# Altium schematic symbol library Robert_.SchLib: 177 symbols (part 4 of 6)
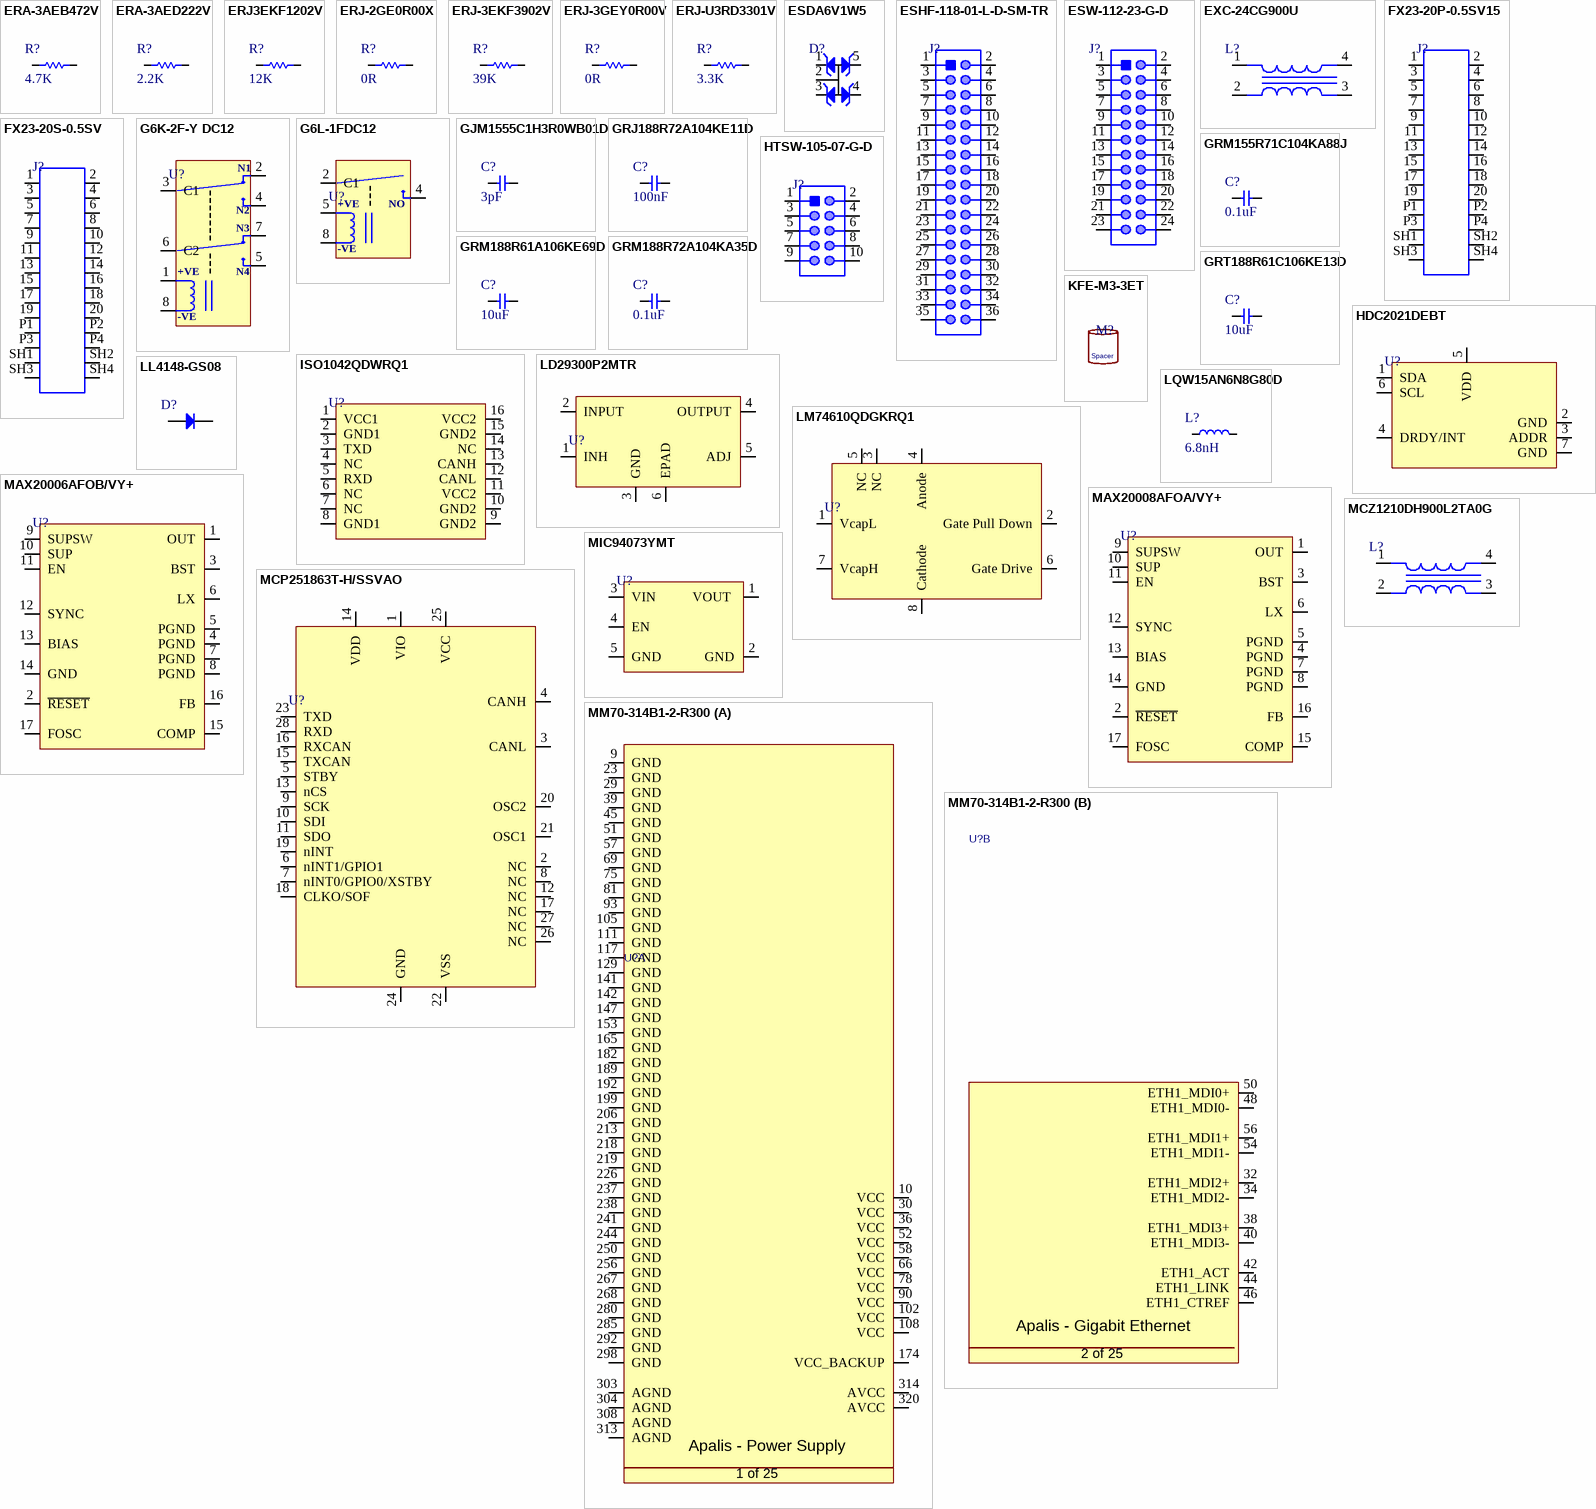
[diagram p9: symbols ERA-3AEB472V to MM70-314B1-2-R300]

## EXC-24CG900U
designator L?
CMC 100MA 2LN 90 OHM SMD; Manufacturer: Panasonic; Manufacturer Part Number: EXC-24CG900U; Supplier: Mouser; Supplier Part Number: 667-EXC-24CG900U; RoHS: Yes; Category: Common Mode Chokes; Stock: 7638; Pricing: 1=0.79, 10=0.547, 50=0.547, 100=0.468, 1000=0.319, 10000=0.293 (USD); ComponentLink1URL: https://datasheet.ciiva.com/11154/aeh0000ce16-11154827.pdf?src-supplier=Avnet; ComponentLink1Description: https://datasheet.ciiva.com/11154/aeh0000ce16-11154827.pdf?src-supplier=Avnet; ComponentLink2URL: https://datasheet.ciiva.com/6216/exc24cg20spec-6216648.pdf?src-supplier=Digi-Key; ComponentLink2Description: https://datasheet.ciiva.com/6216/exc24cg20spec-6216648.pdf?src-supplier=Digi-Key; ComponentLink3URL: https://datasheet.ciiva.com/30197/aeh0000ce16-30197409.pdf?src-supplier=Onlinecomponents.com; ComponentLink3Description: https://datasheet.ciiva.com/30197/aeh0000ce16-30197409.pdf?src-supplier=Onlinecomponents.com; ComponentLink4URL: https://datasheet.ciiva.com/7854/1322261-7854104.pdf?src-supplier=Element14; ComponentLink4Description: https://datasheet.ciiva.com/7854/1322261-7854104.pdf?src-supplier=Element14; ComponentLink5URL: https://datasheet.ciiva.com/22774/1322261-22774599.pdf?src-supplier=Farnell; ComponentLink5Description: https://datasheet.ciiva.com/22774/1322261-22774599.pdf?src-supplier=Farnell; ComponentLink6URL: https://datasheet.ciiva.com/6216/exc24cg-spec-6216651.pdf?src-supplier=Digi-Key; ComponentLink6Description: https://datasheet.ciiva.com/6216/exc24cg-spec-6216651.pdf?src-supplier=Digi-Key; ComponentLink7URL: https://datasheet.ciiva.com/6216/exc24cg-spec-6216654.pdf?src-supplier=Digi-Key; ComponentLink7Description: https://datasheet.ciiva.com/6216/exc24cg-spec-6216654.pdf?src-supplier=Digi-Key
footprint 0504 (1210 Metric), 4 Lead
pins: 1, 2, 3, 4

## FX23-20P-0.5SV15
designator J?
CONN HDR 20POS SMD GOLD; Manufacturer: Hirose; Manufacturer Part Number: FX23-20P-0.5SV15; Supplier: Future Electronics; Supplier Part Number: 4093766; RoHS: Yes; Category: Board to Board Connectors; Stock: 1092; Pricing: 84=2.41, 168=2.36, 252=2.34, 420=2.31, 840=2.25 (USD); ComponentLink1URL: https://www.hirose.com/product/en/download_file/key_name/FX23-20P-0.5SV15/category/Specification%20Sheet/doc_file_id/88145/?file_category_id=9&item_id=05733001000&is_series=&src-supplier=Digi-Key; ComponentLink1Description: https://www.hirose.com/product/en/download_file/key_name/FX23-20P-0.5SV15/category/Specification%20Sheet/doc_file_id/88145/?file_category_id=9&item_id=05733001000&is_series=&src-supplier=Digi-Key; ComponentLink2URL: https://datasheet.octopart.com/FX23-20P-0.5SV15-Hirose-datasheet-155938459.pdf?src-supplier=Sager+Electronics; ComponentLink2Description: https://datasheet.octopart.com/FX23-20P-0.5SV15-Hirose-datasheet-155938459.pdf?src-supplier=Sager+Electronics
footprint FX23-20P-0.5SV15
pins: 1, 2, 3, 4, 5, 6, 7, 8, 9, 10, 11, 12, 13, 14, 15, 16, 17, 18, 19, 20, P1, P2, P3, P4, SH1, SH2, SH3, SH4

## FX23-20S-0.5SV
designator J?
CONN RCPT 20POS SMD GOLD; Manufacturer: Hirose; Manufacturer Part Number: FX23-20S-0.5SV; Supplier: Future Electronics; Supplier Part Number: 9113545; RoHS: Yes; Category: Board to Board Connectors; Stock: 84; Pricing: 84=1.74, 252=1.69, 336=1.68, 840=1.65, 1260=1.61 (USD); ComponentLink1URL: https://datasheet.octopart.com/FX23-20S-0.5SV-Hirose-datasheet-147827136.pdf?src-supplier=Future+Electronics; ComponentLink1Description: https://datasheet.octopart.com/FX23-20S-0.5SV-Hirose-datasheet-147827136.pdf?src-supplier=Future+Electronics; ComponentLink2URL: https://www.hirose.com/product/en/download_file/key_name/FX23-20S-0.5SV/category/Specification%20Sheet/doc_file_id/88096/?file_category_id=9&item_id=05733201000&is_series=&src-supplier=Digi-Key; ComponentLink2Description: https://www.hirose.com/product/en/download_file/key_name/FX23-20S-0.5SV/category/Specification%20Sheet/doc_file_id/88096/?file_category_id=9&item_id=05733201000&is_series=&src-supplier=Digi-Key; ComponentLink3URL: https://datasheet.octopart.com/FX23-20S-0.5SV-Hirose-datasheet-155938459.pdf?src-supplier=Sager+Electronics; ComponentLink3Description: https://datasheet.octopart.com/FX23-20S-0.5SV-Hirose-datasheet-155938459.pdf?src-supplier=Sager+Electronics
footprint FX23-20S-0.5SV
pins: 1, 2, 3, 4, 5, 6, 7, 8, 9, 10, 11, 12, 13, 14, 15, 16, 17, 18, 19, 20, P1, P2, P3, P4, SH1, SH2, SH3, SH4

## G6K-2F-Y DC12
designator U?
RELAY TELECOM DPDT 1A 12VDC; Manufacturer: Omron; Manufacturer Part Number: G6K-2F-Y DC12; Supplier: Rs; Supplier Part Number: 2334168; RoHS: Yes; Category: Signal Relays; Stock: 2055; Pricing: 1=3.1, 10=2.99, 100=2.92, 250=2.78 (GBP)
footprint G6K-2F-Y DC12
pins: 1 +VE, 2 N1, 3 C1, 4 N2, 5 N4, 6 C2, 7 N3, 8 -VE

## G6L-1FDC12
designator U?
RELAY TELECOM SPST 1A 12VDC; Manufacturer: Omron; Manufacturer Part Number: G6L-1FDC12; Supplier: Arrow Electronics; Supplier Part Number: G6L-1F-DC12; RoHS: Yes; Category: Signal Relays; Stock: 764; Pricing: 1=3.229, 10=2.966, 25=2.652, 50=2.416, 100=2.239, 250=2.053, 500=1.91, 1000=1.756, 5000=1.705 (USD); ComponentLink1URL: https://datasheet.ciiva.com/2416/g6l-0614-2416511.pdf?src-supplier=Digi-Key; ComponentLink1Description: https://datasheet.ciiva.com/2416/g6l-0614-2416511.pdf?src-supplier=Digi-Key; ComponentLink2URL: https://datasheet.ciiva.com/15185/getdatasheetpartid-153492-15185645.pdf?src-supplier=Verical; ComponentLink2Description: https://datasheet.ciiva.com/15185/getdatasheetpartid-153492-15185645.pdf?src-supplier=Verical
footprint G6L-1FDC12
pins: 2 C1, 4 NO, 5 +VE, 8 -VE

## GJM1555C1H3R0WB01D
designator C?, comment 3pF
CAP CER 3PF 50V C0G/NP0 0402; Manufacturer: Murata; Manufacturer Part Number: GJM1555C1H3R0WB01D; Dielectric: C0G; Item Type: Capacitor; Supplier: Rs; Supplier Part Number: 1853357; RoHS: Yes; Category: Ceramic Capacitors; Stock: 2000; Pricing: 500=0.044, 2500=0.03, 5000=0.028 (GBP); Mounting Technology: Surface Mount; Case/Package: 0402; Case Code (Imperial): 0402; Case Code (Metric): 1005; Min Operating Temperature: -55°C; Max Operating Temperature: 125°C; Value: 3pF; Package Quantity: 10000; Packaging: Tape and Reel; Voltage Rating: 50V; Voltage Rating (DC): 50V; Termination: SMD/SMT; Series: GJM; Construction: Flat; Length: 1mm; Width: 0.02inch; Height: 0.5mm; Thickness: 0.022inch; Depth: 0.5mm; Radiation Hardening: No; RoHS Compliant: Yes; ComponentLink1URL: http://www.mouser.com/ds/2/281/c02e-2905.pdf?src-supplier=Mouser; ComponentLink1Description: http://www.mouser.com/ds/2/281/c02e-2905.pdf?src-supplier=Mouser; ComponentLink2URL: http://search.murata.co.jp/Ceramy/image/img/A01X/G101/ENG/GJM1555C1H3R0WB01-01.pdf?src-supplier=Digi-Key; ComponentLink2Description: http://search.murata.co.jp/Ceramy/image/img/A01X/G101/ENG/GJM1555C1H3R0WB01-01.pdf?src-supplier=Digi-Key; ComponentLink3URL: http://search.murata.co.jp/Ceramy/image/img/A01X/partnumbering_e_01.pdf?src-supplier=Digi-Key; ComponentLink3Description: http://search.murata.co.jp/Ceramy/image/img/A01X/partnumbering_e_01.pdf?src-supplier=Digi-Key; ComponentLink4URL: http://search.murata.co.jp/Ceramy/image/img/PDF/ENG/GJM1555C1H3R0WB01.pdf?src-supplier=Avnet; ComponentLink4Description: http://search.murata.co.jp/Ceramy/image/img/PDF/ENG/GJM1555C1H3R0WB01.pdf?src-supplier=Avnet; ComponentLink5URL: http://components.arrow.com/part/dataview/46522145S277297N2606?src-supplier=Arrow+Electronics; ComponentLink5Description: http://components.arrow.com/part/dataview/46522145S277297N2606?src-supplier=Arrow+Electronics; ComponentLink6URL: https://datasheet.octopart.com/GJM1555C1H3R0WB01D-Murata-datasheet-12511495.pdf?src-supplier=TME; ComponentLink6Description: https://datasheet.octopart.com/GJM1555C1H3R0WB01D-Murata-datasheet-12511495.pdf?src-supplier=TME
footprint Cap-0402
pins: 1, 2

## GRJ188R72A104KE11D
designator C?, comment 100nF
CAP CER 0.1UF 100V X7R 0603; Manufacturer: Murata; Manufacturer Part Number: GRJ188R72A104KE11D; Item Type: Capacitor; Supplier: Arrow Electronics; Supplier Part Number: GRJ188R72A104KE11D; RoHS: Yes; Category: Ceramic Capacitors; Stock: 1124; Pricing: 1=0.1544, 10=0.0939, 25=0.0801, 100=0.0545, 250=0.054, 500=0.0486, 1000=0.0431 (USD); ComponentLink1URL: https://www.murata.com/~/media/webrenewal/support/library/catalog/products/k70e.ashx?la=en-us&src-supplier=Digi-Key; ComponentLink1Description: https://www.murata.com/~/media/webrenewal/support/library/catalog/products/k70e.ashx?la=en-us&src-supplier=Digi-Key; ComponentLink2URL: https://datasheet.octopart.com/GRJ188R72A104KE11D-Murata-datasheet-32479577.pdf?src-supplier=Future+Electronics; ComponentLink2Description: https://datasheet.octopart.com/GRJ188R72A104KE11D-Murata-datasheet-32479577.pdf?src-supplier=Future+Electronics
footprint Cap-0603
pins: 1, 2

## GRM155R71C104KA88J
designator C?, comment 0.1uF
CAP CER 0.1UF 16V X7R 0402; Manufacturer: Murata; Manufacturer Part Number: GRM155R71C104KA88J; Material: 4241ConductorMaterial; Value: 100nF; Tolerance: 10%; Supplier: Arrow Electronics; Supplier Part Number: GRM155R71C104KA88J; RoHS: Yes; Category: Ceramic Capacitors; Stock: 300000; Pricing: 50000=0.004, 100000=0.0034, 150000=0.0033 (USD); Mounting Technology: Surface Mount; Case/Package: 0402; Pins: 2NUMBER; Case Code (Metric): 1005; Case Code (Imperial): 0402; Min Operating Temperature: -55°C; Max Operating Temperature: 125°C; Package Quantity: 1; Voltage Rating: 16V; Packaging: Tape and Reel; Dielectric: X7R; Voltage Rating (DC): 16V; Termination: SMD/SMT; Voltage: 16V; Series: GRM; Construction: Flat; Length: 1mm; Width: 0.02inch; Height: 0.5mm; Thickness: 0.022inch; Depth: 0.5mm; Radiation Hardening: No; Reach SVHC Compliant: No; Lead Free: Lead Free; RoHS Compliant: Yes; ComponentLink1URL: https://datasheet.ciiva.com/6271/product-6271168.pdf?src-supplier=Digi-Key; ComponentLink1Description: https://datasheet.ciiva.com/6271/product-6271168.pdf?src-supplier=Digi-Key; ComponentLink2URL: https://datasheet.ciiva.com/6271/grm155r71c104ka88-01-6271231.pdf?src-supplier=Digi-Key; ComponentLink2Description: https://datasheet.ciiva.com/6271/grm155r71c104ka88-01-6271231.pdf?src-supplier=Digi-Key
footprint Cap-0402
pins: 1, 2

## GRM188R61A106KE69D
designator C?, comment 10uF
CAP CER 10UF 10V X5R 0603; Manufacturer: Murata; Manufacturer Part Number: GRM188R61A106KE69D; Tolerance: 10%; Item Type: Capacitor; Supplier: Future Electronics; Supplier Part Number: 1008140; RoHS: Yes; Category: Ceramic Capacitors; Stock: 36000; Pricing: 4000=0.0237, 12000=0.0228, 20000=0.0224, 60000=0.0216, 100000=0.0209 (USD); Mounting Technology: Surface Mount; Case/Package: 0603; Case Code (Metric): 1608; Case Code (Imperial): 0603; Min Operating Temperature: -55°C; Max Operating Temperature: 85°C; Value: 10uF; Packaging: Cut Tape; Dielectric: X5R; Voltage Rating: 10V; Voltage: 10V; Voltage Rating (DC): 10V; Series: GRM; Length: 0.063inch; Width: 0.031inch; Height: 0.8mm; Thickness: 0.037inch; Depth: 0.8mm; Reach SVHC Compliant: No; Lead Free: Lead Free; RoHS Compliant: Yes; ComponentLink1URL: http://www.farnell.com/datasheets/1955682.pdf?src-supplier=Farnell; ComponentLink1Description: http://www.farnell.com/datasheets/1955682.pdf?src-supplier=Farnell; ComponentLink2URL: http://www.mouser.com/ds/2/281/c02e-2905.pdf?src-supplier=Mouser; ComponentLink2Description: http://www.mouser.com/ds/2/281/c02e-2905.pdf?src-supplier=Mouser; ComponentLink3URL: http://www.farnell.com/datasheets/1955682.pdf?src-supplier=Newark; ComponentLink3Description: http://www.farnell.com/datasheets/1955682.pdf?src-supplier=Newark; ComponentLink4URL: http://www.farnell.com/datasheets/1955682.pdf?src-supplier=Element14; ComponentLink4Description: http://www.farnell.com/datasheets/1955682.pdf?src-supplier=Element14; ComponentLink5URL: https://datasheet.octopart.com/GRM188R61A106KE69D-Murata-datasheet-46741888.pdf?src-supplier=Element14; ComponentLink5Description: https://datasheet.octopart.com/GRM188R61A106KE69D-Murata-datasheet-46741888.pdf?src-supplier=Element14; ComponentLink6URL: http://search.murata.co.jp/Ceramy/image/img/A01X/G101/ENG/GRM188R61A106KE69-01.pdf?src-supplier=Digi-Key; ComponentLink6Description: http://search.murata.co.jp/Ceramy/image/img/A01X/G101/ENG/GRM188R61A106KE69-01.pdf?src-supplier=Digi-Key; ComponentLink7URL: http://psearch.en.murata.com/capacitor/product/GRM188R61A106KE69%23.pdf?src-supplier=Avnet; ComponentLink7Description: http://psearch.en.murata.com/capacitor/product/GRM188R61A106KE69%23.pdf?src-supplier=Avnet
footprint Cap-0603
pins: 1, 2

## GRM188R72A104KA35D
designator C?, comment 0.1uF
CAP CER 0.1UF 100V X7R 0603; Manufacturer: Murata; Manufacturer Part Number: GRM188R72A104KA35D; Material: Ceramic; Value: 100nF; Tolerance: 10%; Supplier: Arrow Electronics; Supplier Part Number: GRM188R72A104KA35D; RoHS: Yes; Category: Ceramic Capacitors; Stock: 28393; Pricing: 1=0.1781, 10=0.0788, 25=0.078, 100=0.0455, 250=0.045, 500=0.0427, 1000=0.0376, 3000=0.0371, 6000=0.0368, 15000=0.0319 (USD); Mounting Technology: Surface Mount; Case/Package: 0603; Weight: 0.000222oz; Case Code (Imperial): 0603; Case Code (Metric): 1608; Min Operating Temperature: -55°C; Max Operating Temperature: 125°C; Dielectric: X7R; Voltage Rating: 100V; Voltage Rating (DC): 100V; Packaging: Tape and Reel; Package Quantity: 1; Termination: SMD/SMT; Voltage: 100V; Series: GRM; Construction: Flat; Length: 1.6mm; Width: 0.031inch; Height: 0.8mm; Thickness: 0.035inch; Depth: 0.8mm; Size: 0.8mm; Radiation Hardening: No; Reach SVHC Compliant: No; Lead Free: Lead Free; RoHS Compliant: Yes; ComponentLink1URL: https://datasheet.ciiva.com/18100/getdatasheetpartid-27818-18100710.pdf?src-supplier=Verical; ComponentLink1Description: https://datasheet.ciiva.com/18100/getdatasheetpartid-27818-18100710.pdf?src-supplier=Verical; ComponentLink2URL: https://datasheet.ciiva.com/22703/1747473-22703345.pdf?src-supplier=Element14; ComponentLink2Description: https://datasheet.ciiva.com/22703/1747473-22703345.pdf?src-supplier=Element14; ComponentLink3URL: https://datasheet.ciiva.com/34302/1857815-34302863.pdf?src-supplier=Jameco; ComponentLink3Description: https://datasheet.ciiva.com/34302/1857815-34302863.pdf?src-supplier=Jameco; ComponentLink4URL: https://datasheet.ciiva.com/11787/0900766b80ef921d-11787064.pdf?src-supplier=Rs; ComponentLink4Description: https://datasheet.ciiva.com/11787/0900766b80ef921d-11787064.pdf?src-supplier=Rs; ComponentLink5URL: https://datasheet.ciiva.com/29201/451984-da-01-en-vs-kondensator-0603-29201725.pdf?src-supplier=Conrad; ComponentLink5Description: https://datasheet.ciiva.com/29201/451984-da-01-en-vs-kondensator-0603-29201725.pdf?src-supplier=Conrad; ComponentLink6URL: https://datasheet.ciiva.com/7937/1747473-7937676.pdf?src-supplier=Element14; ComponentLink6Description: https://datasheet.ciiva.com/7937/1747473-7937676.pdf?src-supplier=Element14; ComponentLink7URL: https://datasheet.ciiva.com/135/partnumbering-e-01-135140.pdf?src-supplier=Digi-Key; ComponentLink7Description: https://datasheet.ciiva.com/135/partnumbering-e-01-135140.pdf?src-supplier=Digi-Key; ComponentLink8URL: https://datasheet.ciiva.com/135/partnumbering-e-01-135139.pdf?src-supplier=Digi-Key; ComponentLink8Description: https://datasheet.ciiva.com/135/partnumbering-e-01-135139.pdf?src-supplier=Digi-Key; ComponentLink9URL: https://datasheet.ciiva.com/135/partnumbering-e-01-135141.pdf?src-supplier=Digi-Key; ComponentLink9Description: https://datasheet.ciiva.com/135/partnumbering-e-01-135141.pdf?src-supplier=Digi-Key; ComponentLink10URL: https://datasheet.ciiva.com/16382/product-16382965.pdf?src-supplier=Future+Electronics; ComponentLink10Description: https://datasheet.ciiva.com/16382/product-16382965.pdf?src-supplier=Future+Electronics
footprint Cap-0603
pins: 1, 2

## GRT188R61C106KE13D
designator C?, comment 10uF
CAP CER 10UF 16V X5R 0603; Manufacturer: Murata; Manufacturer Part Number: GRT188R61C106KE13D; Supplier: Arrow Electronics; Supplier Part Number: GRT188R61C106KE13D; RoHS: Yes; Category: Ceramic Capacitors; Stock: 26129; Pricing: 1=0.3636, 10=0.1969, 25=0.195, 100=0.1263, 250=0.125, 500=0.113, 1000=0.0949, 3000=0.0939, 6000=0.093, 15000=0.0784 (USD); ComponentLink1URL: http://search.murata.co.jp/Ceramy/image/img/A01X/G101/ENG/GRT188R61C106KE13-01.pdf?src-supplier=Digi-Key; ComponentLink1Description: http://search.murata.co.jp/Ceramy/image/img/A01X/G101/ENG/GRT188R61C106KE13-01.pdf?src-supplier=Digi-Key
footprint Cap-0603
pins: 1, 2

## HDC2021DEBT
designator U?
SENSOR MULT HUMIDITY/TEMP; Manufacturer: Texas Instruments; Manufacturer Part Number: HDC2021DEBT; Supplier: Mouser; Supplier Part Number: 595-HDC2021DEBT; RoHS: No; Category: Integrated Circuits (ICs); Stock: 4417; Pricing: 1=5.04, 10=3.2, 50=3.2, 100=3.1, 1000=2.42, 10000=2.33 (USD)
footprint HDC2021DEBT
pins: 1 SDA, 2 GND, 3 ADDR, 4 DRDY/INT, 5 VDD, 6 SCL, 7 GND

## HTSW-105-07-G-D
designator J?
CONN HEADER VERT 10POS 2.54MM; Manufacturer: Samtec; Manufacturer Part Number: HTSW-105-07-G-D; Supplier: Rs; Supplier Part Number: 1592350; RoHS: Yes; Category: Connectors; Stock: 16; Pricing: 1=1.3, 25=1.16, 50=1.09, 100=1, 500=0.81 (GBP); ComponentLink1URL: https://datasheet.ciiva.com/737/htsw-xxx-xx-xxx-x-xx-xx-xx-mkt-737898.pdf?src-supplier=Digi-Key; ComponentLink1Description: https://datasheet.ciiva.com/737/htsw-xxx-xx-xxx-x-xx-xx-xx-mkt-737898.pdf?src-supplier=Digi-Key; ComponentLink2URL: https://datasheet.ciiva.com/15195/getdatasheetpartid-252145-15195445.pdf?src-supplier=Verical; ComponentLink2Description: https://datasheet.ciiva.com/15195/getdatasheetpartid-252145-15195445.pdf?src-supplier=Verical
footprint HTSW-105-07-G-D
pins: 1, 2, 3, 4, 5, 6, 7, 8, 9, 10

## ISO1042QDWRQ1
designator U?
IC TRANSCEIVER FULL 1/1 16SOIC; Manufacturer: Texas Instruments; Manufacturer Part Number: ISO1042QDWRQ1; Supplier: Mouser; Supplier Part Number: 595-ISO1042QDWRQ1; RoHS: Yes; Category: Interface ICs; Stock: 7185; Pricing: 1=4.22, 10=3.8, 50=3.8, 100=3.11, 1000=2.24, 10000=2.04 (USD); ComponentLink1URL: http://www.ti.com/general/docs/suppproductinfo.tsp?distId=10&amp;gotoUrl=http%3A%2F%2Fwww.ti.com%2Flit%2Fgpn%2Fiso1042-q1&src-supplier=Digi-Key; ComponentLink1Description: http://www.ti.com/general/docs/suppproductinfo.tsp?distId=10&amp;gotoUrl=http%3A%2F%2Fwww.ti.com%2Flit%2Fgpn%2Fiso1042-q1&src-supplier=Digi-Key; ComponentLink2URL: http://www.ti.com/lit/ds/symlink/iso1042-q1.pdf?src-supplier=Digi-Key; ComponentLink2Description: http://www.ti.com/lit/ds/symlink/iso1042-q1.pdf?src-supplier=Digi-Key; LCSC Part Number: C2671569; Item Type: IC
footprint SOP-16-300mil
pins: 1 VCC1, 2 GND1, 3 TXD, 4 NC, 5 RXD, 6 NC, 7 NC, 8 GND1, 9 GND2, 10 GND2, 11 VCC2, 12 CANL, 13 CANH, 14 NC, 15 GND2, 16 VCC2

## KFE-M3-3ET
designator M?
Standoffs & Spacers Broaching Standoff M3 3mm Carbon Steel; Manufacturer: PennEngineering; Manufacturer Part Number: KFE-M3-3ET; Supplier: Mouser; Supplier Part Number: 153-KFE-M3-3ET; RoHS: No; Stock: 27757; Pricing: 1=0.47, 10=0.445, 50=0.324, 100=0.3, 1000=0.229, 10000=0.19 (USD)
text: Spacer

## LD29300P2MTR
designator U?
IC REG LINEAR POS ADJ 3A P2PAK-4; Manufacturer: STMicroelectronics; Manufacturer Part Number: LD29300P2MTR; Supplier: Mouser; Supplier Part Number: 511-LD29300P2MTR; RoHS: Yes; Category: Voltage Regulators - Linear; Stock: 29557; Pricing: 1=1.81, 10=1.63, 50=1.54, 100=1.31, 1000=0.908, 10000=0.886 (USD); ComponentLink1URL: https://datasheet.ciiva.com/17077/ld29300p2mtr-17077916.pdf?src-supplier=Allied+Electronics; ComponentLink1Description: https://datasheet.ciiva.com/17077/ld29300p2mtr-17077916.pdf?src-supplier=Allied+Electronics; ComponentLink2URL: https://datasheet.ciiva.com/41440/001185831-da-01-en-ic-reg-ldo-adj-ld29300p2mtr-to-263-6-stm-41440915.pdf?src-supplier=Conrad; ComponentLink2Description: https://datasheet.ciiva.com/41440/001185831-da-01-en-ic-reg-ldo-adj-ld29300p2mtr-to-263-6-stm-41440915.pdf?src-supplier=Conrad; ComponentLink3URL: https://datasheet.ciiva.com/2044/cd00003208-2044196.pdf?src-supplier=Digi-Key; ComponentLink3Description: https://datasheet.ciiva.com/2044/cd00003208-2044196.pdf?src-supplier=Digi-Key; ComponentLink4URL: https://datasheet.ciiva.com/2044/cd00003208-2044197.pdf?src-supplier=Digi-Key; ComponentLink4Description: https://datasheet.ciiva.com/2044/cd00003208-2044197.pdf?src-supplier=Digi-Key; ComponentLink5URL: https://datasheet.ciiva.com/2044/cd00003208-2044198.pdf?src-supplier=Digi-Key; ComponentLink5Description: https://datasheet.ciiva.com/2044/cd00003208-2044198.pdf?src-supplier=Digi-Key
footprint P2PAK-4
pins: 1 INH, 2 INPUT, 3 GND, 4 OUTPUT, 5 ADJ, 6 EPAD

## LL4148-GS08
designator D?
DIODE GEN PURP 75V 300MA SOD80; Manufacturer: Vishay; Manufacturer Part Number: LL4148-GS08; Max Power Dissipation: 500mW; Forward Current: 150mA; Reverse Recovery Time: 8ns; Peak Non-Repetitive Surge Current: 2A; Max Repetitive Reverse Voltage (Vrrm): 100V; Primary Type: SWITCHING; Outside Diameter: 1.5mm; Supplier: Mouser; Supplier Part Number: 78-LL4148; RoHS: Yes; Category: Rectifier Diodes; Stock: 423192; Pricing: 1=0.14, 10=0.126, 50=0.126, 100=0.06, 500=0.037, 1000=0.028, 2500=0.022, 10000=0.019, 25000=0.017, 50000=0.015 (USD); Mounting Technology: Surface Mount; Pins: 2; Min Operating Temperature: -65°C; Max Operating Temperature: 175°C; Packaging: Cut Tape; Package Quantity: 1; Average Rectified Current: 300mA; Power Dissipation: 500mW; Max Forward Surge Current (Ifsm): 2A; Termination: SMD/SMT; Current Rating: 150mA; Voltage: 100V; Max Reverse Voltage (DC): 75V; Series: -; Reverse Recovery Time-Max: 8ns; Diameter: 1.6mm; Length: 3.7mm; Radiation Hardening: No; Lead Free: Lead Free; RoHS Compliant: Yes; Reach SVHC Compliant: Unknown; ComponentLink1URL: https://datasheet.ciiva.com/4246/ll4148-4246131.pdf?src-supplier=Arrow+Electronics; ComponentLink1Description: https://datasheet.ciiva.com/4246/ll4148-4246131.pdf?src-supplier=Arrow+Electronics; ComponentLink2URL: https://datasheet.ciiva.com/1243/1353494-1243008.pdf?src-supplier=Newark; ComponentLink2Description: https://datasheet.ciiva.com/1243/1353494-1243008.pdf?src-supplier=Newark; ComponentLink3URL: https://datasheet.ciiva.com/34301/891018-34301682.pdf?src-supplier=Jameco; ComponentLink3Description: https://datasheet.ciiva.com/34301/891018-34301682.pdf?src-supplier=Jameco; ComponentLink4URL: https://datasheet.ciiva.com/1181/1513919-1181029.pdf?src-supplier=Element14; ComponentLink4Description: https://datasheet.ciiva.com/1181/1513919-1181029.pdf?src-supplier=Element14; ComponentLink5URL: https://datasheet.ciiva.com/1243/1699941-1243749.pdf?src-supplier=Newark; ComponentLink5Description: https://datasheet.ciiva.com/1243/1699941-1243749.pdf?src-supplier=Newark; ComponentLink6URL: https://datasheet.ciiva.com/26311/1722544-26311744.pdf?src-supplier=Element14; ComponentLink6Description: https://datasheet.ciiva.com/26311/1722544-26311744.pdf?src-supplier=Element14; ComponentLink7URL: https://datasheet.ciiva.com/1181/1353494-1181031.pdf?src-supplier=Element14; ComponentLink7Description: https://datasheet.ciiva.com/1181/1353494-1181031.pdf?src-supplier=Element14; ComponentLink8URL: https://datasheet.ciiva.com/5829/1513919-5829997.pdf?src-supplier=Farnell; ComponentLink8Description: https://datasheet.ciiva.com/5829/1513919-5829997.pdf?src-supplier=Farnell; ComponentLink9URL: https://datasheet.ciiva.com/13946/ll4148-13946731.pdf?src-supplier=Digi-Key; ComponentLink9Description: https://datasheet.ciiva.com/13946/ll4148-13946731.pdf?src-supplier=Digi-Key; ComponentLink10URL: https://datasheet.ciiva.com/13946/ll4148-13946732.pdf?src-supplier=Digi-Key; ComponentLink10Description: https://datasheet.ciiva.com/13946/ll4148-13946732.pdf?src-supplier=Digi-Key; ComponentLink11URL: https://datasheet.ciiva.com/16298/ll4148-16298094.pdf?src-supplier=Future+Electronics; ComponentLink11Description: https://datasheet.ciiva.com/16298/ll4148-16298094.pdf?src-supplier=Future+Electronics; ComponentLink12URL: https://datasheet.ciiva.com/1181/1353494-1181030.pdf?src-supplier=Element14; ComponentLink12Description: https://datasheet.ciiva.com/1181/1353494-1181030.pdf?src-supplier=Element14; ComponentLink13URL: https://datasheet.ciiva.com/4434/ll4148-105055-4434938.pdf?src-supplier=Mouser; ComponentLink13Description: https://datasheet.ciiva.com/4434/ll4148-105055-4434938.pdf?src-supplier=Mouser; ComponentLink14URL: https://datasheet.ciiva.com/8287/ll4148-8287871.pdf?src-supplier=Avnet; ComponentLink14Description: https://datasheet.ciiva.com/8287/ll4148-8287871.pdf?src-supplier=Avnet; ComponentLink15URL: https://datasheet.ciiva.com/8287/ll4148-8287869.pdf?src-supplier=Avnet; ComponentLink15Description: https://datasheet.ciiva.com/8287/ll4148-8287869.pdf?src-supplier=Avnet; ComponentLink16URL: https://datasheet.ciiva.com/13946/ll4148-13946733.pdf?src-supplier=Digi-Key; ComponentLink16Description: https://datasheet.ciiva.com/13946/ll4148-13946733.pdf?src-supplier=Digi-Key; ComponentLink17URL: https://datasheet.ciiva.com/25936/ll4148-25936391.pdf?; ComponentLink17Description: https://datasheet.ciiva.com/25936/ll4148-25936391.pdf?
footprint SOD-80 MiniMELF
pins: 1 K, 2 A

## LM74610QDGKRQ1
designator U?
IC SMART DIODE CTLR 8VSSOP; Manufacturer: Texas Instruments; Manufacturer Part Number: LM74610QDGKRQ1; Supplier: Mouser; Supplier Part Number: 595-LM74610QDGKRQ1; RoHS: Yes; Category: Power Management ICs; Stock: 5066; Pricing: 1=2.47, 10=2.1, 50=2.1, 100=1.83, 1000=1.31, 10000=1.14 (USD); ComponentLink1URL: http://www.ti.com/lit/ds/symlink/lm74610-q1.pdf?src-supplier=Digi-Key; ComponentLink1Description: http://www.ti.com/lit/ds/symlink/lm74610-q1.pdf?src-supplier=Digi-Key
footprint VSSOP-8 (3x3)
pins: 1 VcapL, 2 Gate Pull Down, 3 NC, 4 Anode, 5 NC, 6 Gate Drive, 7 VcapH, 8 Cathode

## LQW15AN6N8G80D
designator L?, comment 6.8nH
FIXED IND 6.8NH 1.45A 0.068OHM; Manufacturer: Murata Electronics; Manufacturer Part Number: LQW15AN6N8G80D; Item Type: Inductor; Package: 0402; Value: 6.8NH; ComponentLink1Description: Digikey; ComponentLink1URL: https://www.digikey.com/en/products/detail/murata-electronics/LQW15AN6N8G80D/4905972?s=N4IgTCBcDaIDIEUDqBGArAQQHIDYsA4BxfABgBEQBdAXyA
footprint IND-0402
pins: 1, 2

## MAX20006AFOB/VY+
designator U?
36V, 220KHZ TO 2.2MHZ, 4A/6A/8A; Manufacturer: Maxim; Manufacturer Part Number: MAX20006AFOB/VY+; Supplier: Mouser; Supplier Part Number: 700-MAX20006AFOB/VY+; RoHS: Yes; Category: Voltage Regulators - Switching; Stock: 619; Pricing: 1=5.03, 10=4.28, 50=4.28, 100=3.71, 1000=2.73, 10000=2.6 (USD)
footprint 17-FC2QFN (3.5x3.75)
pins: 1 OUT, 2 ~{RESET}, 3 BST, 4 PGND, 5 PGND, 6 LX, 7 PGND, 8 PGND, 9 SUPSW, 10 SUP, 11 EN, 12 SYNC, 13 BIAS, 14 GND, 15 COMP, 16 FB, 17 FOSC

## MAX20008AFOA/VY+
designator U?
36V, 220KHZ TO 2.2MHZ, 4A/6A/8A; Manufacturer: Analog Devices; Manufacturer Part Number: MAX20008AFOA/VY+; Supplier: Mouser; Supplier Part Number: 700-MAX20008AFOA/VY+; RoHS: No; Stock: 429; Pricing: 1=5.55, 10=4.86, 50=4.86, 100=4.08, 1000=3.46, 10000=3.46 (USD)
footprint 17-FC2QFN (3.5x3.75)
pins: 1 OUT, 2 ~{RESET}, 3 BST, 4 PGND, 5 PGND, 6 LX, 7 PGND, 8 PGND, 9 SUPSW, 10 SUP, 11 EN, 12 SYNC, 13 BIAS, 14 GND, 15 COMP, 16 FB, 17 FOSC

## MCP251863T-H/SSVAO
designator U?
STAND-ALONE LOW POWER CAN FD CON; Manufacturer: Microchip; Manufacturer Part Number: MCP251863T-H/SSVAO; Item Type: IC; Supplier: Digi-Key; Supplier Part Number: 150-MCP251863T-H/SSVAOTR-ND; RoHS: No; Category: Uncategorized
footprint SSOP-28-208mil
pins: 1 VIO, 2 NC, 3 CANL, 4 CANH, 5 STBY, 6 nINT1/GPIO1, 7 nINT0/GPIO0/XSTBY, 8 NC, 9 SCK, 10 SDI, 11 SDO, 12 NC, 13 nCS, 14 VDD, 15 TXCAN, 16 RXCAN, 17 NC, 18 CLKO/SOF, 19 nINT, 20 OSC2, 21 OSC1, 22 VSS, 23 TXD, 24 GND, 25 VCC, 26 NC, 27 NC, 28 RXD

## MCZ1210DH900L2TA0G
designator L?
CMC 100MA 2LN 90 OHM SMD; Manufacturer: TDK; Manufacturer Part Number: MCZ1210DH900L2TA0G; Supplier: Mouser; Supplier Part Number: 810-MCZ1210DH900L2TG; RoHS: Yes; Category: Common Mode Chokes; Stock: 11260; Pricing: 1=0.58, 10=0.372, 50=0.372, 100=0.297, 1000=0.231, 10000=0.231 (USD); ComponentLink1URL: https://media.digikey.com/pdf/Data%20Sheets/TDK%20PDFs/MCZ_Series_Br.pdf?src-supplier=Digi-Key; ComponentLink1Description: https://media.digikey.com/pdf/Data%20Sheets/TDK%20PDFs/MCZ_Series_Br.pdf?src-supplier=Digi-Key; ComponentLink2URL: https://product.tdk.com/info/en/catalog/datasheets/cmf_commercial_signal_mcz1210dh_en.pdf?src-supplier=Digi-Key; ComponentLink2Description: https://product.tdk.com/info/en/catalog/datasheets/cmf_commercial_signal_mcz1210dh_en.pdf?src-supplier=Digi-Key
footprint MCZ1210DH900L2TA0G
pins: 1, 2, 3, 4

## MIC94073YMT
designator U?
HIGH SIDE POWER SWITCHES; Manufacturer: Mirel Inc.; Manufacturer Part Number: MIC94073YMT; Package: 4-UFDFN Exposed Pad, 4-TMLF®; Item Type: Power Switch
footprint 4-TMLF® (1.2x1.6)
pins: 1 VOUT , 2 GND, 3 VIN, 4 EN, 5 GND

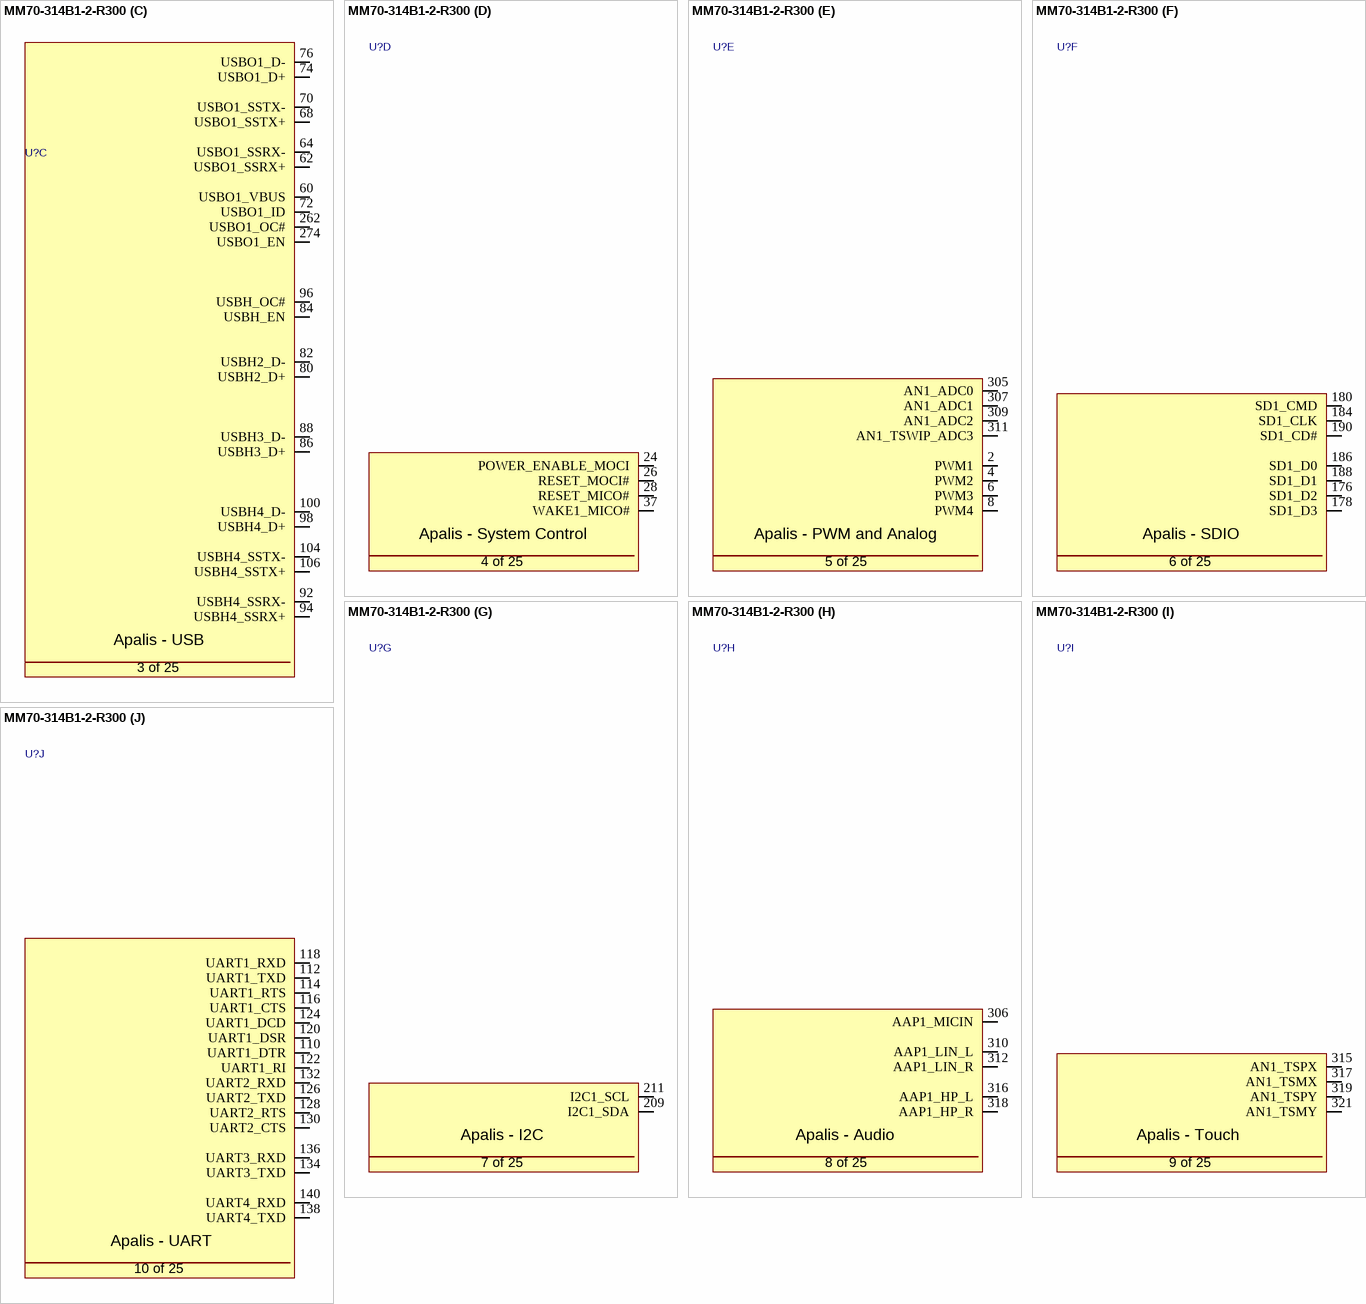
[diagram p3: symbol MM70-314B1-2-R300]

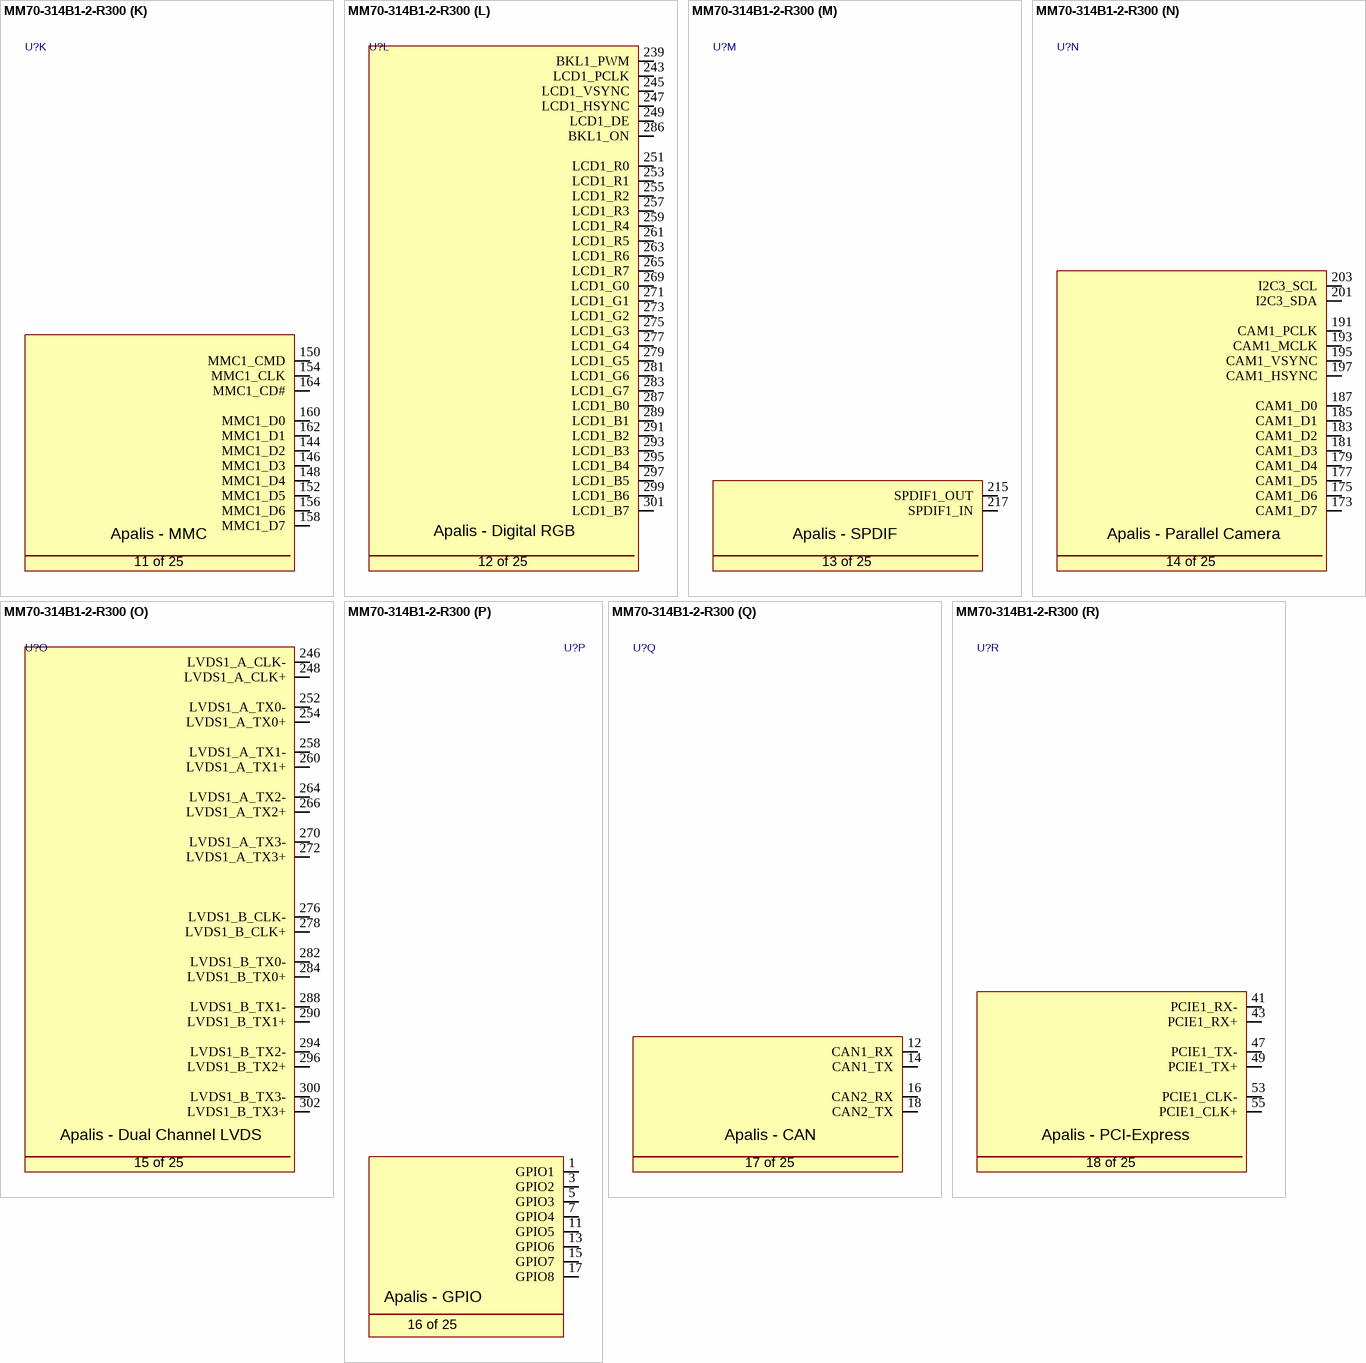
[diagram p4: symbol MM70-314B1-2-R300]

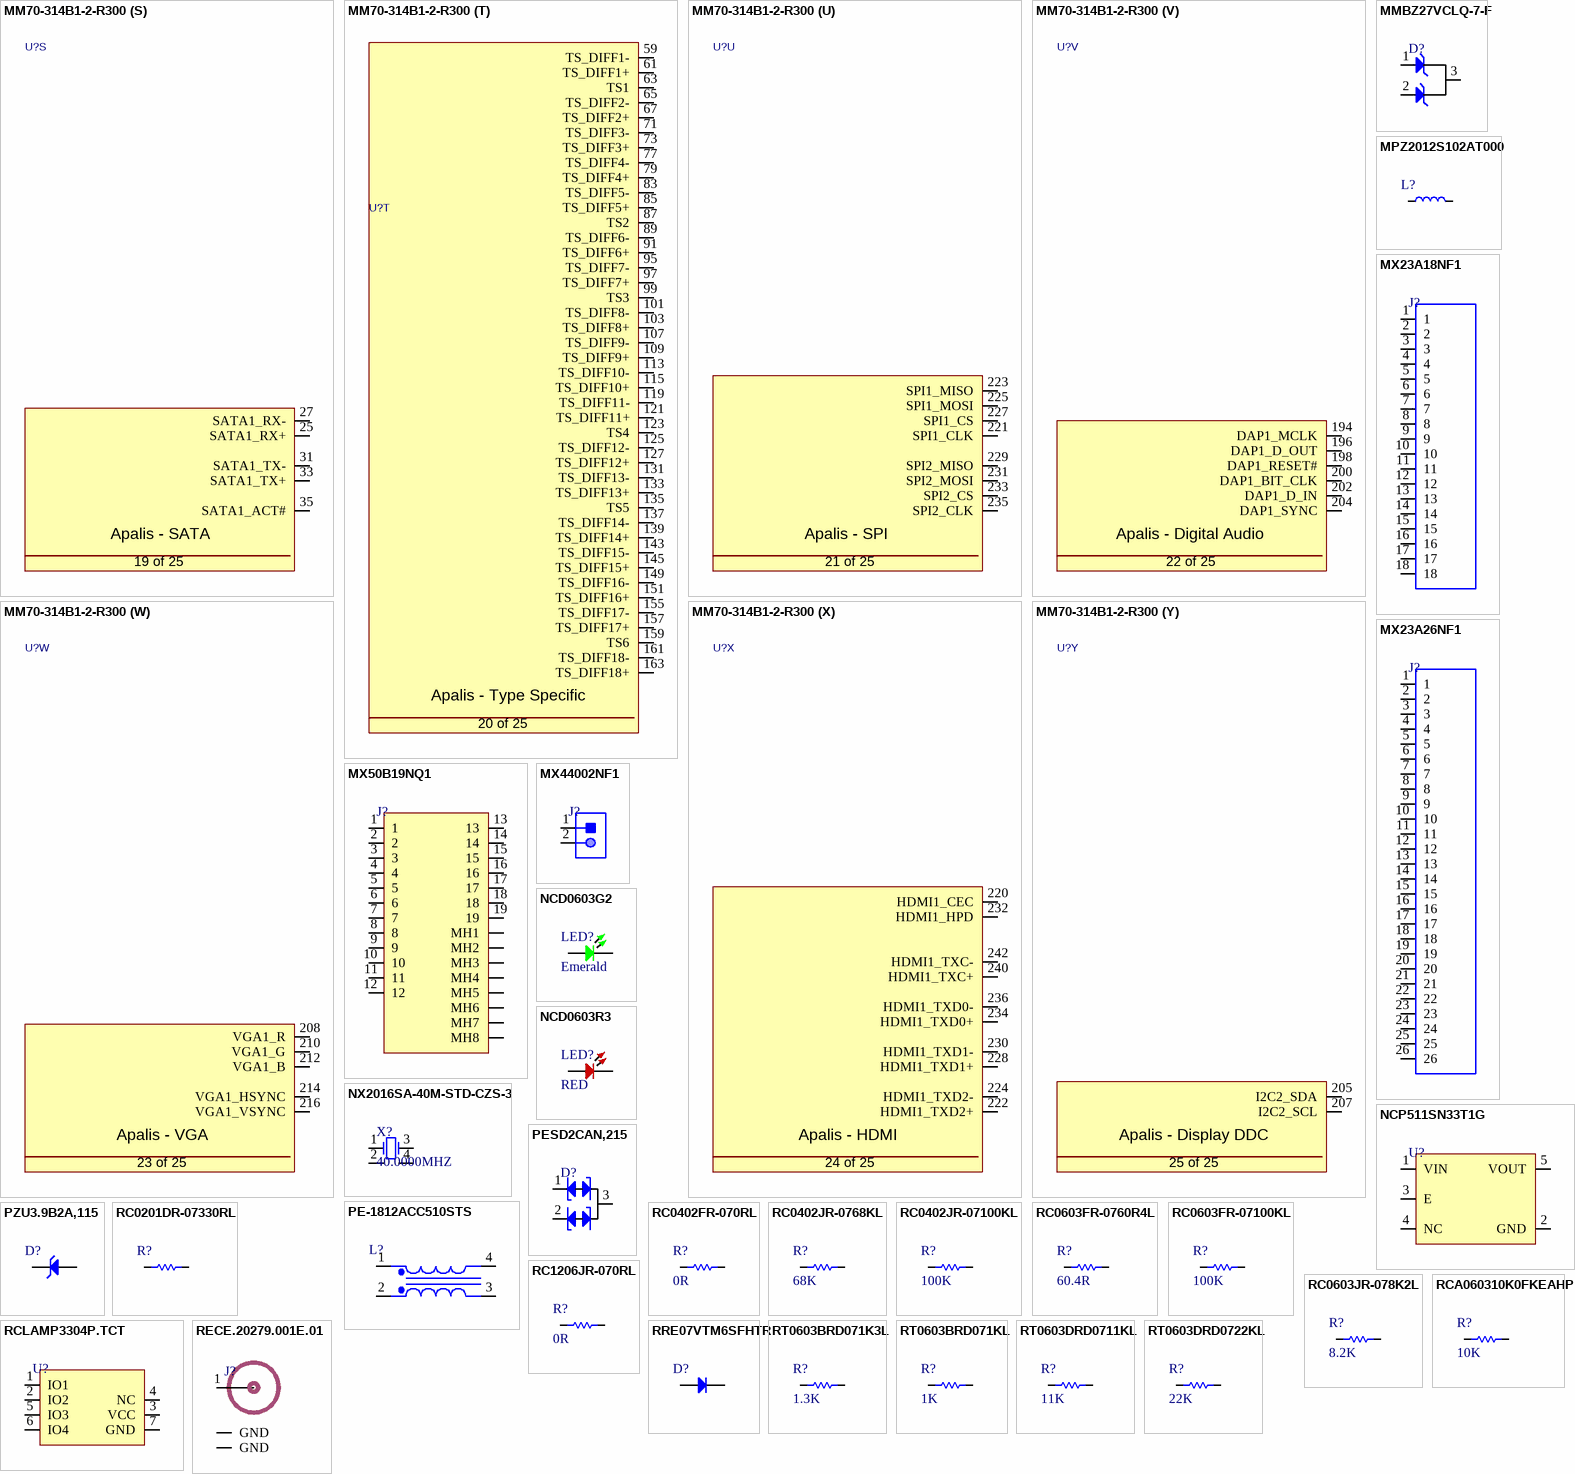
[diagram p5: symbols MM70-314B1-2-R300 to RT0603DRD0722KL]

## MM70-314B1-2-R300
designator U?
CONN MXM 3.0 FMALE 314POS 0.020; Manufacturer: JAE Electronics; Manufacturer Part Number: MM70-314B1-2-R300; Supplier: Digi-Key; Supplier Part Number: 670-MM70-314B1-2-R300CT-ND; RoHS: No; Category: Card Edge Connectors; Stock: 4979; Pricing: 1=9.21, 10=8.287, 25=7.8064, 50=7.6064, 100=7.4062 (USD)
footprint MM70-314B1-2-R300
part A pins: 9 GND, 10 VCC, 23 GND, 29 GND (power), 30 VCC, 36 VCC, 39 GND (power), 45 GND (power), 51 GND (power), 52 VCC, 57 GND (power), 58 VCC, 66 VCC, 69 GND (power), 75 GND (power), 78 VCC, 81 GND (power), 90 VCC, 93 GND (power), 102 VCC, 105 GND (power), 108 VCC, 111 GND (power), 117 GND (power), 129 GND (power), 141 GND (power), 142 GND (power), 147 GND (power), 153 GND (power), 165 GND (power), 174 VCC_BACKUP, 182 GND (power), 189 GND (power), 192 GND (power), 199 GND (power), 206 GND (power), 213 GND (power), 218 GND (power), 219 GND (power), 226 GND (power), 237 GND (power), 238 GND (power), 241 GND (power), 244 GND (power), 250 GND (power), 256 GND (power), 267 GND (power), 268 GND (power), 280 GND (power), 285 GND (power), 292 GND (power), 298 GND (power), 303 AGND (power), 304 AGND (power), 308 AGND (power), 313 AGND, 314 AVCC (power), 320 AVCC
part B pins: 32 ETH1_MDI2+, 34 ETH1_MDI2-, 38 ETH1_MDI3+, 40 ETH1_MDI3-, 42 ETH1_ACT, 44 ETH1_LINK, 46 ETH1_CTREF, 48 ETH1_MDI0-, 50 ETH1_MDI0+, 54 ETH1_MDI1-, 56 ETH1_MDI1+
part C pins: 60 USBO1_VBUS, 62 USBO1_SSRX+, 64 USBO1_SSRX-, 68 USBO1_SSTX+, 70 USBO1_SSTX-, 72 USBO1_ID, 74 USBO1_D+, 76 USBO1_D-, 80 USBH2_D+, 82 USBH2_D-, 84 USBH_EN, 86 USBH3_D+, 88 USBH3_D-, 92 USBH4_SSRX-, 94 USBH4_SSRX+, 96 USBH_OC#, 98 USBH4_D+, 100 USBH4_D-, 104 USBH4_SSTX-, 106 USBH4_SSTX+, 262 USBO1_OC#, 274 USBO1_EN
part D pins: 24 POWER_ENABLE_MOCI, 26 RESET_MOCI#, 28 RESET_MICO#, 37 WAKE1_MICO#
part E pins: 2 PWM1, 4 PWM2, 6 PWM3, 8 PWM4, 305 AN1_ADC0, 307 AN1_ADC1, 309 AN1_ADC2, 311 AN1_TSWIP_ADC3
part F pins: 176 SD1_D2, 178 SD1_D3, 180 SD1_CMD, 184 SD1_CLK, 186 SD1_D0, 188 SD1_D1, 190 SD1_CD#
part G pins: 209 I2C1_SDA, 211 I2C1_SCL
part H pins: 306 AAP1_MICIN, 310 AAP1_LIN_L, 312 AAP1_LIN_R, 316 AAP1_HP_L, 318 AAP1_HP_R
part I pins: 315 AN1_TSPX, 317 AN1_TSMX, 319 AN1_TSPY, 321 AN1_TSMY
part J pins: 110 UART1_DTR, 112 UART1_TXD, 114 UART1_RTS, 116 UART1_CTS, 118 UART1_RXD, 120 UART1_DSR, 122 UART1_RI, 124 UART1_DCD, 126 UART2_TXD, 128 UART2_RTS, 130 UART2_CTS, 132 UART2_RXD, 134 UART3_TXD, 136 UART3_RXD, 138 UART4_TXD, 140 UART4_RXD
part K pins: 144 MMC1_D2, 146 MMC1_D3, 148 MMC1_D4, 150 MMC1_CMD, 152 MMC1_D5, 154 MMC1_CLK, 156 MMC1_D6, 158 MMC1_D7, 160 MMC1_D0, 162 MMC1_D1, 164 MMC1_CD#
part L pins: 239 BKL1_PWM, 243 LCD1_PCLK, 245 LCD1_VSYNC, 247 LCD1_HSYNC, 249 LCD1_DE, 251 LCD1_R0, 253 LCD1_R1, 255 LCD1_R2, 257 LCD1_R3, 259 LCD1_R4, 261 LCD1_R5, 263 LCD1_R6, 265 LCD1_R7, 269 LCD1_G0, 271 LCD1_G1, 273 LCD1_G2, 275 LCD1_G3, 277 LCD1_G4, 279 LCD1_G5, 281 LCD1_G6, 283 LCD1_G7, 286 BKL1_ON, 287 LCD1_B0, 289 LCD1_B1, 291 LCD1_B2, 293 LCD1_B3, 295 LCD1_B4, 297 LCD1_B5, 299 LCD1_B6, 301 LCD1_B7
part M pins: 215 SPDIF1_OUT, 217 SPDIF1_IN
part N pins: 173 CAM1_D7, 175 CAM1_D6, 177 CAM1_D5, 179 CAM1_D4, 181 CAM1_D3, 183 CAM1_D2, 185 CAM1_D1, 187 CAM1_D0, 191 CAM1_PCLK, 193 CAM1_MCLK, 195 CAM1_VSYNC, 197 CAM1_HSYNC, 201 I2C3_SDA, 203 I2C3_SCL
part O pins: 246 LVDS1_A_CLK-, 248 LVDS1_A_CLK+, 252 LVDS1_A_TX0-, 254 LVDS1_A_TX0+, 258 LVDS1_A_TX1-, 260 LVDS1_A_TX1+, 264 LVDS1_A_TX2-, 266 LVDS1_A_TX2+, 270 LVDS1_A_TX3-, 272 LVDS1_A_TX3+, 276 LVDS1_B_CLK-, 278 LVDS1_B_CLK+, 282 LVDS1_B_TX0-, 284 LVDS1_B_TX0+, 288 LVDS1_B_TX1-, 290 LVDS1_B_TX1+, 294 LVDS1_B_TX2-, 296 LVDS1_B_TX2+, 300 LVDS1_B_TX3-, 302 LVDS1_B_TX3+
part P pins: 1 GPIO1, 3 GPIO2, 5 GPIO3, 7 GPIO4, 11 GPIO5, 13 GPIO6, 15 GPIO7, 17 GPIO8
part Q pins: 12 CAN1_RX, 14 CAN1_TX, 16 CAN2_RX, 18 CAN2_TX
part R pins: 41 PCIE1_RX-, 43 PCIE1_RX+, 47 PCIE1_TX-, 49 PCIE1_TX+, 53 PCIE1_CLK-, 55 PCIE1_CLK+
part S pins: 25 SATA1_RX+, 27 SATA1_RX-, 31 SATA1_TX-, 33 SATA1_TX+, 35 SATA1_ACT#
part T pins: 59 TS_DIFF1-, 61 TS_DIFF1+, 63 TS1, 65 TS_DIFF2-, 67 TS_DIFF2+, 71 TS_DIFF3-, 73 TS_DIFF3+, 77 TS_DIFF4-, 79 TS_DIFF4+, 83 TS_DIFF5-, 85 TS_DIFF5+, 87 TS2, 89 TS_DIFF6-, 91 TS_DIFF6+, 95 TS_DIFF7-, 97 TS_DIFF7+, 99 TS3, 101 TS_DIFF8-, 103 TS_DIFF8+, 107 TS_DIFF9-, 109 TS_DIFF9+, 113 TS_DIFF10-, 115 TS_DIFF10+, 119 TS_DIFF11-, 121 TS_DIFF11+, 123 TS4, 125 TS_DIFF12-, 127 TS_DIFF12+, 131 TS_DIFF13-, 133 TS_DIFF13+, 135 TS5, 137 TS_DIFF14-, 139 TS_DIFF14+, 143 TS_DIFF15-, 145 TS_DIFF15+, 149 TS_DIFF16-, 151 TS_DIFF16+, 155 TS_DIFF17-, 157 TS_DIFF17+, 159 TS6, 161 TS_DIFF18-, 163 TS_DIFF18+
part U pins: 221 SPI1_CLK, 223 SPI1_MISO, 225 SPI1_MOSI, 227 SPI1_CS, 229 SPI2_MISO, 231 SPI2_MOSI, 233 SPI2_CS, 235 SPI2_CLK
part V pins: 194 DAP1_MCLK, 196 DAP1_D_OUT, 198 DAP1_RESET#, 200 DAP1_BIT_CLK, 202 DAP1_D_IN, 204 DAP1_SYNC
part W pins: 208 VGA1_R, 210 VGA1_G, 212 VGA1_B, 214 VGA1_HSYNC, 216 VGA1_VSYNC
part X pins: 220 HDMI1_CEC, 222 HDMI1_TXD2+, 224 HDMI1_TXD2-, 228 HDMI1_TXD1+, 230 HDMI1_TXD1-, 232 HDMI1_HPD, 234 HDMI1_TXD0+, 236 HDMI1_TXD0-, 240 HDMI1_TXC+, 242 HDMI1_TXC-
part Y pins: 205 I2C2_SDA, 207 I2C2_SCL
part A text: Apalis - Power Supply; 1 of 25
part B text: Apalis - Gigabit Ethernet; 2 of 25
part C text: Apalis - USB; 3 of 25
part D text: Apalis - System Control; 4 of 25
part E text: Apalis - PWM and Analog; 5 of 25
part F text: Apalis - SDIO; 6 of 25
part G text: Apalis - I2C; 7 of 25
part H text: Apalis - Audio; 8 of 25
part I text: Apalis - Touch; 9 of 25
part J text: Apalis - UART; 10 of 25
part K text: Apalis - MMC; 11 of 25
part L text: Apalis - Digital RGB; 12 of 25
part M text: Apalis - SPDIF; 13 of 25
part N text: Apalis - Parallel Camera; 14 of 25
part O text: Apalis - Dual Channel LVDS; 15 of 25
part P text: Apalis - GPIO; 16 of 25
part Q text: Apalis - CAN; 17 of 25
part R text: Apalis - PCI-Express; 18 of 25
part S text: Apalis - SATA; 19 of 25
part T text: Apalis - Type Specific; 20 of 25
part U text: Apalis - SPI; 21 of 25
part V text: Apalis - Digital Audio; 22 of 25
part W text: Apalis - VGA; 23 of 25
part X text: Apalis - HDMI; 24 of 25
part Y text: Apalis - Display DDC; 25 of 25

## MMBZ27VCLQ-7-F
designator D?
TRANSIENT VOLTAGE SUPPRESSOR PP; Manufacturer: Diodes; Manufacturer Part Number: MMBZ27VCLQ-7-F; Direction: Unidirectional,Bidirectional; Working Voltage: 22V; Power Rating: 40W; Supplier: Mouser; Supplier Part Number: 621-MMBZ27VCLQ-7-F; RoHS: Yes; Category: TVS Diodes; Stock: 3000; Pricing: 1=0.33, 10=0.231, 50=0.231, 100=0.113, 1000=0.066, 10000=0.041 (USD); Mounting Technology: Surface Mount; Case/Package: SOT-23; Pins: 3; Min Operating Temperature: -65°C; Max Operating Temperature: 150°C; Radiation Hardening: No; RoHS Compliant: Yes; ComponentLink1URL: https://datasheet.ciiva.com/29883/ds30352-29883833.pdf?src-supplier=Avnet; ComponentLink1Description: https://datasheet.ciiva.com/29883/ds30352-29883833.pdf?src-supplier=Avnet
footprint SOT-23 (TRANS NPN 40V 0.6A SOT23)
pins: 1, 2, 3

## MPZ2012S102AT000
designator L?
FERRITE BEAD 1K OHM 0805 1LN; Manufacturer: TDK; Manufacturer Part Number: MPZ2012S102AT000; Supplier: Avnet; Supplier Part Number: MPZ2012S102AT000; RoHS: Yes; Category: Ferrite Beads and Chips; Stock: 20000; Pricing: 4000=0.03386, 8000=0.03203, 16000=0.0302, 24000=0.02759, 32000=0.02581 (USD); ComponentLink1URL: https://datasheet.ciiva.com/46381/1856146-46381611.pdf?src-supplier=Element14; ComponentLink1Description: https://datasheet.ciiva.com/46381/1856146-46381611.pdf?src-supplier=Element14; ComponentLink2URL: https://datasheet.ciiva.com/48682/beads-commercial-power-mpz-en-48682506.pdf?src-supplier=Avnet; ComponentLink2Description: https://datasheet.ciiva.com/48682/beads-commercial-power-mpz-en-48682506.pdf?src-supplier=Avnet; ComponentLink3URL: https://datasheet.ciiva.com/46634/beads-commercial-power-mpz-en-46634366.pdf?src-supplier=Digi-Key; ComponentLink3Description: https://datasheet.ciiva.com/46634/beads-commercial-power-mpz-en-46634366.pdf?src-supplier=Digi-Key; ComponentLink4URL: https://datasheet.ciiva.com/46634/beads-commercial-power-mpz-en-46634422.pdf?src-supplier=Digi-Key; ComponentLink4Description: https://datasheet.ciiva.com/46634/beads-commercial-power-mpz-en-46634422.pdf?src-supplier=Digi-Key; ComponentLink5URL: https://datasheet.ciiva.com/46634/beads-commercial-power-mpz-en-46634424.pdf?src-supplier=Digi-Key; ComponentLink5Description: https://datasheet.ciiva.com/46634/beads-commercial-power-mpz-en-46634424.pdf?src-supplier=Digi-Key
footprint Ind-0805 (Inductor 0805)
pins: 1, 2

## MX23A18NF1
designator J?
CONN HEADER R/A 18POS 2.5MM; Manufacturer: JAE Electronics; Manufacturer Part Number: MX23A18NF1; Supplier: Rs; Supplier Part Number: 435784; RoHS: Yes; Category: Connectors; Stock: 117; Pricing: 1=6.45, 10=6.27, 25=6.1, 50=5.93, 75=5.78 (GBP); ComponentLink1URL: https://datasheet.ciiva.com/11754/0900766b80b7ac1f-11754128.pdf?src-supplier=Rs; ComponentLink1Description: https://datasheet.ciiva.com/11754/0900766b80b7ac1f-11754128.pdf?src-supplier=Rs; ComponentLink2URL: https://datasheet.ciiva.com/732/transportation-pg-v2-2-732928.pdf?src-supplier=Digi-Key; ComponentLink2Description: https://datasheet.ciiva.com/732/transportation-pg-v2-2-732928.pdf?src-supplier=Digi-Key
footprint MX23A18NF1
pins: 1, 2, 3, 4, 5, 6, 7, 8, 9, 10, 11, 12, 13, 14, 15, 16, 17, 18

## MX23A26NF1
designator J?
CONN HEADER R/A 26POS 2.5MM; Manufacturer: JAE Electronics; Manufacturer Part Number: MX23A26NF1; Current Rating: 3A; Gender: Male; Connector Type: Header,Power,Rectangular; Number of Positions: 26; Insulation Resistance: 100MR; Wire Gauge (Max): 16AWG; Wire Gauge (Min): 22AWG; Outside Diameter: 2.2mm; Ratings: Waterproof; Supplier: Rs; Supplier Part Number: 435774; RoHS: Yes; Category: Automotive Connectors; Stock: 42; Pricing: 1=7.15, 10=6.83, 20=6.5 (GBP); Mounting Technology: Through Hole; Contact Material: Copper Alloy,Brass,Copper; Contact Plating: Tin; Color: Black; Material: PBT,Polybutylene; Contact Shape: Square; Contact Finish - Mating: TIN; Insulation Material: PBT; Insulation Color: Black; Min Operating Temperature: -40°C; Max Operating Temperature: 125°C; Number of Rows: 2; Packaging: Bulk; Package Quantity: 160; Termination: Solder; Number of Contacts: 26; Orientation: Right Angle; Features: WATERPROOF; Series: MX23A; Contact Type: Male Pin; Fastening Type: Latch; Length: 44mm; Pitch: 2.5mm; Reach SVHC Compliant: No; RoHS Compliant: Yes; ComponentLink1URL: https://datasheet.ciiva.com/11748/0900766b80fc1621-11748856.pdf?src-supplier=Rs; ComponentLink1Description: https://datasheet.ciiva.com/11748/0900766b80fc1621-11748856.pdf?src-supplier=Rs; ComponentLink2URL: https://datasheet.ciiva.com/7621/611555-7621573.pdf?src-supplier=Element14; ComponentLink2Description: https://datasheet.ciiva.com/7621/611555-7621573.pdf?src-supplier=Element14; ComponentLink3URL: https://datasheet.ciiva.com/726/transportation-pg-v2-2-726957.pdf?src-supplier=Digi-Key; ComponentLink3Description: https://datasheet.ciiva.com/726/transportation-pg-v2-2-726957.pdf?src-supplier=Digi-Key
footprint MX23A26NF1
pins: 1, 2, 3, 4, 5, 6, 7, 8, 9, 10, 11, 12, 13, 14, 15, 16, 17, 18, 19, 20, 21, 22, 23, 24, 25, 26

## MX50B19NQ1
designator J?
Automotive Connectors HDMI Type E Connector, 19 pos., Receptacle, Without Flange; Manufacturer: JAE Electronics; Manufacturer Part Number: MX50B19NQ1; Supplier: Digi-Key; Supplier Part Number: 670-MX50B19NQ1-ND; RoHS: No; Category: Uncategorized; Pricing: 140=3.65621 (USD)
footprint MX50B19NQ1
pins: 1, 2, 3, 4, 5, 6, 7, 8, 9, 10, 11, 12, 13, 14, 15, 16, 17, 18, 19, MH1, MH2, MH3, MH4, MH5, MH6, MH7, MH8

## MX44002NF1
designator J?
CONN HEADER BRD EDGE 2POS 3.5MM; Manufacturer: JAE Electronics; Manufacturer Part Number: MX44002NF1; Supplier: Mouser; Supplier Part Number: 656-MX44002NF1; RoHS: Yes; Category: Automotive Connectors; Stock: 525; Pricing: 1=5.41, 10=4.37, 50=4.37, 100=4.33, 1000=3.14, 10000=2.92 (USD); ComponentLink1URL: https://datasheet.ciiva.com/13878/sj107054-48235-13878974.pdf?src-supplier=Mouser; ComponentLink1Description: https://datasheet.ciiva.com/13878/sj107054-48235-13878974.pdf?src-supplier=Mouser; ComponentLink2URL: https://datasheet.ciiva.com/11754/0900766b80fb029b-11754147.pdf?src-supplier=Rs; ComponentLink2Description: https://datasheet.ciiva.com/11754/0900766b80fb029b-11754147.pdf?src-supplier=Rs; ComponentLink3URL: https://datasheet.ciiva.com/7621/1448958-7621599.pdf?src-supplier=Element14; ComponentLink3Description: https://datasheet.ciiva.com/7621/1448958-7621599.pdf?src-supplier=Element14; ComponentLink4URL: https://datasheet.ciiva.com/733/transportation-pg-v2-2-733517.pdf?src-supplier=Digi-Key; ComponentLink4Description: https://datasheet.ciiva.com/733/transportation-pg-v2-2-733517.pdf?src-supplier=Digi-Key; ComponentLink5URL: https://datasheet.ciiva.com/29364/l0132s0193blm18p-29364421.pdf?src-supplier=Digi-Key; ComponentLink5Description: https://datasheet.ciiva.com/29364/l0132s0193blm18p-29364421.pdf?src-supplier=Digi-Key; ComponentLink6URL: https://datasheet.ciiva.com/29364/l0132s0193blm18p-29364423.pdf?src-supplier=Digi-Key; ComponentLink6Description: https://datasheet.ciiva.com/29364/l0132s0193blm18p-29364423.pdf?src-supplier=Digi-Key; ComponentLink7URL: https://datasheet.ciiva.com/29364/l0132s0193blm18p-29364425.pdf?src-supplier=Digi-Key; ComponentLink7Description: https://datasheet.ciiva.com/29364/l0132s0193blm18p-29364425.pdf?src-supplier=Digi-Key
footprint MX44002NF1
pins: 1, 2

## NCD0603G2
designator LED?, comment Emerald
Emerald 0603 Light Emitting Diodes (LED) ROHS; Manufacturer: Foshan NationStar Optoelectronics; Manufacturer Part Number: NCD0603G2; Package: 0603; LCSC Part Number: C87326; Item Type: LED; ComponentLink1Description: LCSC; ComponentLink1URL: https://www.lcsc.com/product-detail/Light-Emitting-Diodes-LED_Foshan-NationStar-Optoelectronics-NCD0603G2_C87326.html
footprint LED-0603
pins: 1, 2

## NCD0603R3
designator LED?, comment RED
RED LED 0603 Light Emitting Diodes; Manufacturer: Foshan NationStar Optoelectronics; Manufacturer Part Number: NCD0603R3; Package: 0603; Item Type: LED; LCSC Part Number: C3151730; ComponentLink1Description: LCSC; ComponentLink1URL: https://www.lcsc.com/product-detail/Light-Emitting-Diodes-LED_Foshan-NationStar-Optoelectronics-NCD0603R3_C3151730.html
footprint LED-0603
pins: 1, 2

## NCP511SN33T1G
designator U?
IC REG LINEAR 3.3V 150MA 5TSOP; Manufacturer: ON Semiconductor; Manufacturer Part Number: NCP511SN33T1G; Number of Channels: 1NUMBER; Supplier: Rs; Supplier Part Number: 8024177P; RoHS: Yes; Category: Voltage Regulators - Linear; Stock: 1750; Pricing: 100=0.346, 1000=0.256, 3000=0.241, 9000=0.235 (GBP); ComponentLink1URL: https://datasheet.ciiva.com/4886/ncp511-d-51608-4886192.pdf?src-supplier=Mouser; ComponentLink1Description: https://datasheet.ciiva.com/4886/ncp511-d-51608-4886192.pdf?src-supplier=Mouser; ComponentLink2URL: https://datasheet.ciiva.com/23604/89913-23604067.pdf?src-supplier=Newark; ComponentLink2Description: https://datasheet.ciiva.com/23604/89913-23604067.pdf?src-supplier=Newark; ComponentLink3URL: https://datasheet.ciiva.com/8073/89913-8073910.pdf?src-supplier=Element14; ComponentLink3Description: https://datasheet.ciiva.com/8073/89913-8073910.pdf?src-supplier=Element14; ComponentLink4URL: https://datasheet.ciiva.com/2042/ncp511-d-2042216.pdf?src-supplier=Digi-Key; ComponentLink4Description: https://datasheet.ciiva.com/2042/ncp511-d-2042216.pdf?src-supplier=Digi-Key; ComponentLink5URL: https://datasheet.ciiva.com/2042/ncp511-d-2042217.pdf?src-supplier=Digi-Key; ComponentLink5Description: https://datasheet.ciiva.com/2042/ncp511-d-2042217.pdf?src-supplier=Digi-Key; ComponentLink6URL: https://datasheet.ciiva.com/2042/ncp511-d-2042218.pdf?src-supplier=Digi-Key; ComponentLink6Description: https://datasheet.ciiva.com/2042/ncp511-d-2042218.pdf?src-supplier=Digi-Key
footprint 5-TSOP
pins: 1 VIN, 2 GND, 3 E, 4 NC, 5 VOUT

## NX2016SA-40M-STD-CZS-3
designator X?, comment 40.0000MHZ
Crystal 40.0000MHZ 8PF SMD; Manufacturer: NDK; Manufacturer Part Number: NX2016SA-40M-STD-CZS-3; Frequency: 40MHz; Frequency Stability: 25ppm; Frequency Tolerance: 10ppm; ESR (Equivalent Series Resistance): 60R; Supplier: Rs; Supplier Part Number: 1847956; RoHS: Yes; Stock: 95; Pricing: 5=0.686 (GBP); Mounting Technology: Surface Mount; Case/Package: SMD/SMT; Min Operating Temperature: -40°C; Max Operating Temperature: 125°C; Packaging: Cut Tape; Load Capacitance: 8pF; Series: -; Ratings: AEC-Q200; RoHS Compliant: Yes; ComponentLink1URL: http://www.ndk.com/images/products/catalog/c_NX2016SA-2_e.pdf?src-supplier=Digi-Key; ComponentLink1Description: http://www.ndk.com/images/products/catalog/c_NX2016SA-2_e.pdf?src-supplier=Digi-Key
footprint NX2016SA-40M-STD-CZS-3
pins: 1 In/Out, 2 GND, 3 Out/In, 4 GND

## PE-1812ACC510STS
designator L?
CMC 230MA 2LN 3.5KOHM SMD; Manufacturer: Pulse Electronics Network; Manufacturer Part Number: PE-1812ACC510STS; Supplier: Future Electronics; Supplier Part Number: 5113590; RoHS: No
footprint PE-1812ACC510STS
pins: 1, 2, 3, 4

## PESD2CAN,215
designator D?
TVS DIODE 24V 41V SOT23; Manufacturer: Nexperia USA; Manufacturer Part Number: PESD2CAN,215; Supplier: Newark; Supplier Part Number: 26AC2942; RoHS: No; Category: Uncategorized; ComponentLink1URL: http://www.farnell.com/datasheets/1750978.pdf?src-supplier=Farnell; ComponentLink1Description: http://www.farnell.com/datasheets/1750978.pdf?src-supplier=Farnell; ComponentLink2URL: http://www.farnell.com/datasheets/1750978.pdf?src-supplier=Element14; ComponentLink2Description: http://www.farnell.com/datasheets/1750978.pdf?src-supplier=Element14; ComponentLink3URL: https://assets.nexperia.com/documents/data-sheet/PESD2CAN.pdf?src-supplier=Digi-Key; ComponentLink3Description: https://assets.nexperia.com/documents/data-sheet/PESD2CAN.pdf?src-supplier=Digi-Key; Item Type: TVS Diode
footprint SOT-23 (TRANS NPN 40V 0.6A SOT23)
pins: 1 K1, 2 K2, 3 C_K

## PZU3.9B2A,115
designator D?
DIODE ZENER 3.9V 320MW SOD323; Manufacturer: Nexperia; Manufacturer Part Number: PZU3.9B2A,115; Impedance: 90R; Max Reverse Leakage Current: 1uA; Power Dissipation: 310mW; Tolerance: 2%; Voltage Tolerance: 5%; Zener Current: 200mA; Element Configuration: 5460ElementConfiguration; Supplier: Avnet; Supplier Part Number: PZU3.9B2A,115; RoHS: Yes; Category: Zener Diodes; Stock: 76880; Pricing: 13228=0.02646, 14000=0.02589, 27000=0.02533, 67000=0.02476, 140000=0.02419, 670000=0.02363, 1400000=0.02306 (USD); Mounting Technology: 8Mount; Case/Package: 92Case; Min Operating Temperature: -55°C; Max Operating Temperature: 150°C; Max Power Dissipation: 320mW; Packaging: 10Packaging; Zener Voltage: 3.9V; Radiation Hardening: 5898YesNo; RoHS Compliant: Yes; ComponentLink1URL: https://datasheet.octopart.com/PZU3.9B2A%2C115-Nexperia-datasheet-140812947.pdf?src-supplier=Farnell; ComponentLink1Description: https://datasheet.octopart.com/PZU3.9B2A%2C115-Nexperia-datasheet-140812947.pdf?src-supplier=Farnell; Item Type: Diode Zener
footprint SOD-323
pins: 1 K, 2 A

## RC0201DR-07330RL
designator R?
RES 330 OHM 0.5% 1/20W 0201; Manufacturer: Yageo; Manufacturer Part Number: RC0201DR-07330RL; Value: 330R; Max Power Dissipation: 50mW; Temperature Coefficient: 200ppm/°C; Item Type: Resistor; Supplier 1: Digi-Key; RoHS: Yes; Category: Chip SMD Resistors; Pricing 1: 10000=0.02267 (USD); Case/Package: 0201; Min Operating Temperature: -55°C; Max Operating Temperature: 125°C; Packaging: Tape and Reel; Number of Terminations: 2; Tolerance: 0.5%; Features: Moisture Resistant; Series: RC; Length: 0.024inch; Width: 0.012inch; Height: 0.01inch; RoHS Compliant: Yes; ComponentLink1URL: http://www.yageo.com.tw/exep/pages/download/literatures/PYu-R_INT-thick_7.pdf?src-supplier=Digi-Key; ComponentLink1Description: http://www.yageo.com.tw/exep/pages/download/literatures/PYu-R_INT-thick_7.pdf?src-supplier=Digi-Key; Supplier Part Number 1: RC0201DR-07330RL-ND; LCSC Part Number: C851717
footprint Res-0201
pins: 1, 2

## RC0402FR-070RL
designator R?, comment 0R
RES 0 OHM JUMPER 1/16W 0402; Manufacturer: Yageo; Manufacturer Part Number: RC0402FR-070RL; Tolerance: 1%; Power Rating: 62.5mW; Voltage Rating: 50V; Temperature Coefficient: 200ppm/°C; Max Power Dissipation: 63mW; Supplier: Future Electronics; Supplier Part Number: 8925950; RoHS: Yes; Category: Chip SMD Resistors; Stock: 15670000; Pricing: 10000=0.0009, 50000=0.0008, 300000=0.0008, 1000000=0.0008, 3000000=0.0007 (USD); Mounting Technology: Surface Mount; Case/Package: 0402; Contact Plating: Tin,Matte; Case Code (Imperial): 0402; Case Code (Metric): 1005; Min Operating Temperature: -55°C; Max Operating Temperature: 155°C; Value: 0R; Packaging: Tape and Reel; Termination: SMD/SMT; Features: Moisture Resistant; Series: RC; Number of Terminations: 2; Length: 1mm; Width: 0.5mm; Height: 0.35mm; Lead Free: Lead Free; RoHS Compliant: Yes
footprint Res-0402
pins: 1, 2